# Altium footprint library sEMG.PcbLib: 71 footprints (part 5 of 5)
Each footprint in its own frame and in the unit in brackets; x right, y up, seen from the top. Pads: shape width x height; smd on the part's side, far side on the other; paste and mask are expansions set on the pad; w line width, h text height; cw(c..) or ccw(c..) is an arc to the next point about the centre after c.
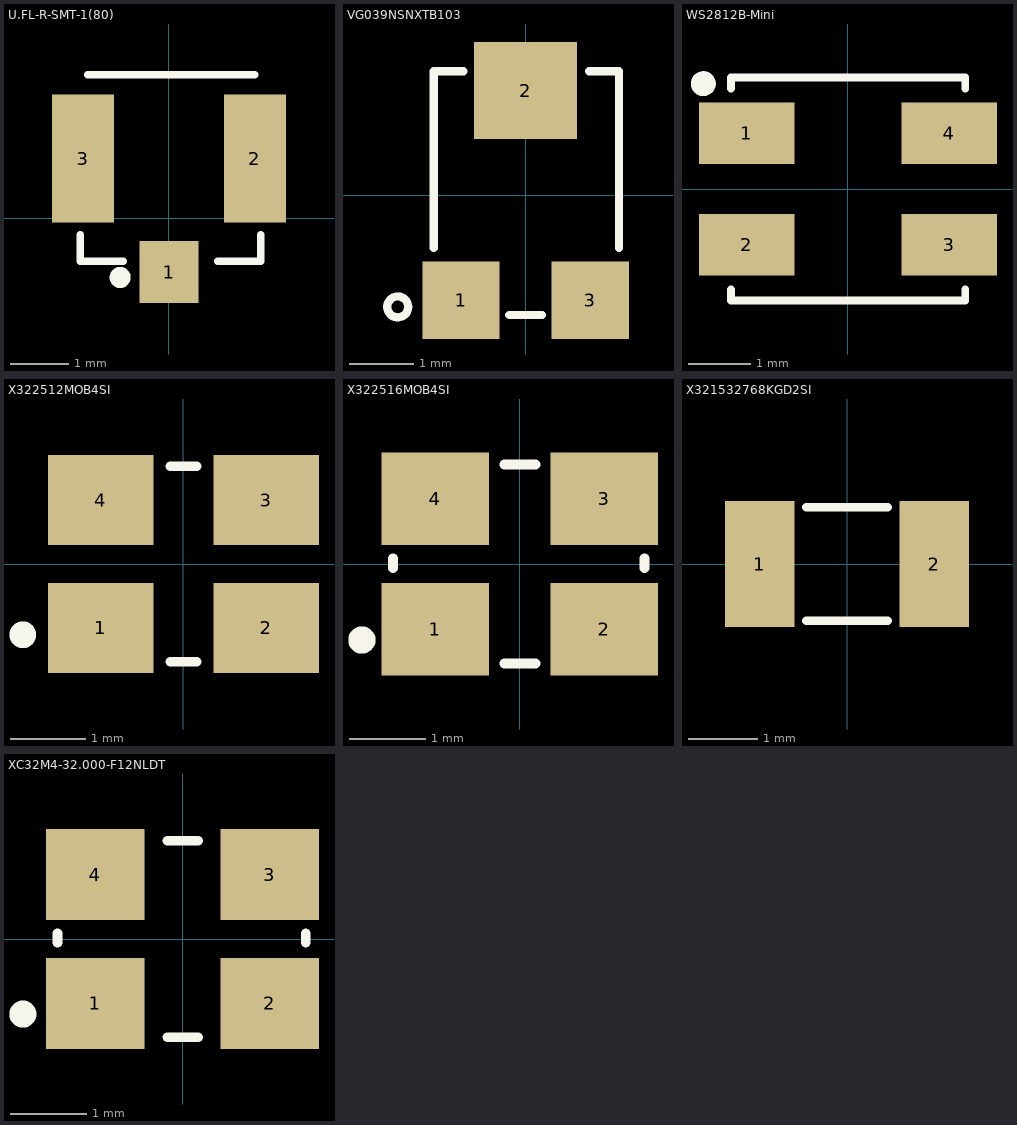
[diagram p4: the footprints below, top view; thin cyan lines are the x and y axes]

## U.FL-R-SMT-1(80) [mm]
pads (3):
  rect 1.02x1.07 smd: 1(0,-0.923)
  rect 1.07x2.2 smd: 2(1.475,1.025) 3(-1.475,1.025)
Top Overlay:
  circle w0.2: c-0.838,-1.016 r0.08
  lines w0.127: -1.524,-0.279 -1.524,-0.737 -0.787,-0.737 ; -1.397,2.464 1.473,2.464 ; 0.838,-0.737 1.575,-0.737 1.575,-0.279
3D body "U.FL-R-SMT-1.stp": height 1.2, standoff -0.05, extent -1.475,-0.686 1.525,2.414

## VG039NSNXTB103 [mm]
pads (3):
  rect 1.2x1.2 smd: 1(-1,-1.625) 3(1,-1.625)
  rect 1.6x1.5 smd: 2(0,1.625)
Top Overlay:
  circle w0.127: c-1.981,-1.727 r0.163
  lines w0.127: -1.424,-0.813 -1.424,1.925 -0.96,1.925 ; -0.254,-1.854 0.254,-1.854 ; 0.985,1.925 1.449,1.925 1.449,-0.813

## WS2812B-Mini [mm] "SMD,3.5x3.5mm Light Emitting Diodes (LED) RoHS"
pads (4):
  rect 1.545x1 smd: 1(-1.638,0.9) 2(-1.638,-0.9) 3(1.638,-0.9) 4(1.638,0.9)
Top Overlay:
  circle w0.2: c-2.337,1.702 r0.102
  lines w0.127: -1.888,-1.626 -1.888,-1.803 1.896,-1.803 1.896,-1.626 ; -1.888,1.626 -1.888,1.803 1.896,1.803 1.896,1.626
3D body "SMD WS2812B Mini.step": height 1.95, standoff 0, extent -1.84,-1.74 1.84,1.74

## X322512MOB4SI [mm]
pads (4):
  rect 1.4x1.2 smd: 1(-1.1,-0.85) 2(1.1,-0.85) 3(1.1,0.85) 4(-1.1,0.85)
Top Overlay:
  circle w0.254: c-2.134,-0.94 r0.051
  lines w0.127: -0.178,-1.295 0.178,-1.295 ; -0.178,1.295 0.178,1.295
3D body "ABM8G.STEP": height 0.99, standoff 0, extent -1.6,-1.245 1.6,1.245

## X322516MOB4SI [mm] "16MHz SMD Crystal Resonator 12pF"
pads (4):
  rect 1.4x1.2 smd: 1(-1.1,-0.85) 2(1.1,-0.85) 3(1.1,0.85) 4(-1.1,0.85)
Top Overlay:
  circle w0.254: c-2.057,-0.991 r0.051
  lines w0.127: -1.651,-0.051 -1.651,0.076 ; -0.203,-1.295 0.203,-1.295 ; -0.203,1.295 0.203,1.295 ; 1.626,-0.051 1.626,0.076
3D body "User Library-Crystal_ECX-32.STEP": height 0.82, standoff 0, extent -1.6,-1.25 1.6,1.25

## X321532768KGD2SI [mm]
pads (2):
  rect 1x1.8 smd: 1(-1.25,0) 2(1.25,0)
Top Overlay:
  lines w0.127: -0.584,-0.813 0.584,-0.813 ; -0.584,0.813 0.584,0.813
3D body "User Library-FX135A-327.step": height 0.9, standoff -0.01, extent -1.6,-0.75 1.6,0.75

## XC32M4-32.000-F12NLDT [mm]
pads (4):
  rect 1.3x1.2 smd: 1(-1.15,-0.85) 2(1.15,-0.85) 3(1.15,0.85) 4(-1.15,0.85)
Top Overlay:
  circle w0.254: c-2.107,-0.991 r0.051
  lines w0.127: -1.65,-0.051 -1.65,0.076 ; -0.202,-1.295 0.204,-1.295 ; -0.202,1.295 0.204,1.295 ; 1.626,-0.051 1.626,0.076
3D body "User Library-Crystal_ECX-32.STEP": height 0.82, standoff 0, extent -1.6,-1.25 1.6,1.25